# Altium integrated library IRLZ34N.IntLib: 1 symbol
Pins are listed as number, name and electrical type; pins without a type are passive.

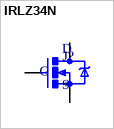
[diagram p0: symbol IRLZ34N]

## IRLZ34N
designator J?
N-Channel 55 V 30A (Tc) 3.8W (Ta), 68W (Tc) Surface Mount D2PAK; MF: Infineon; MP: IRLZ34N; SnapEDA_Link: https://www.snapeda.com/parts/IRLZ34N/Infineon/view-part/?ref=snap; Package: TO-220 Infineon; Value: *; Check_prices: https://www.snapeda.com/parts/IRLZ34N/Infineon/view-part/?ref=eda
footprint TO-220(2)
pins: GND D, IN G, OUT S